# EAGLE library part STM32MP157FAB1 (library STM32MP157FAB1)
32-bit Microcontrollers - MCU 16/32-BITS MICROS Source: Datasheet <https://www.st.com/resource/en/datasheet/stm32mp157f.pdf>
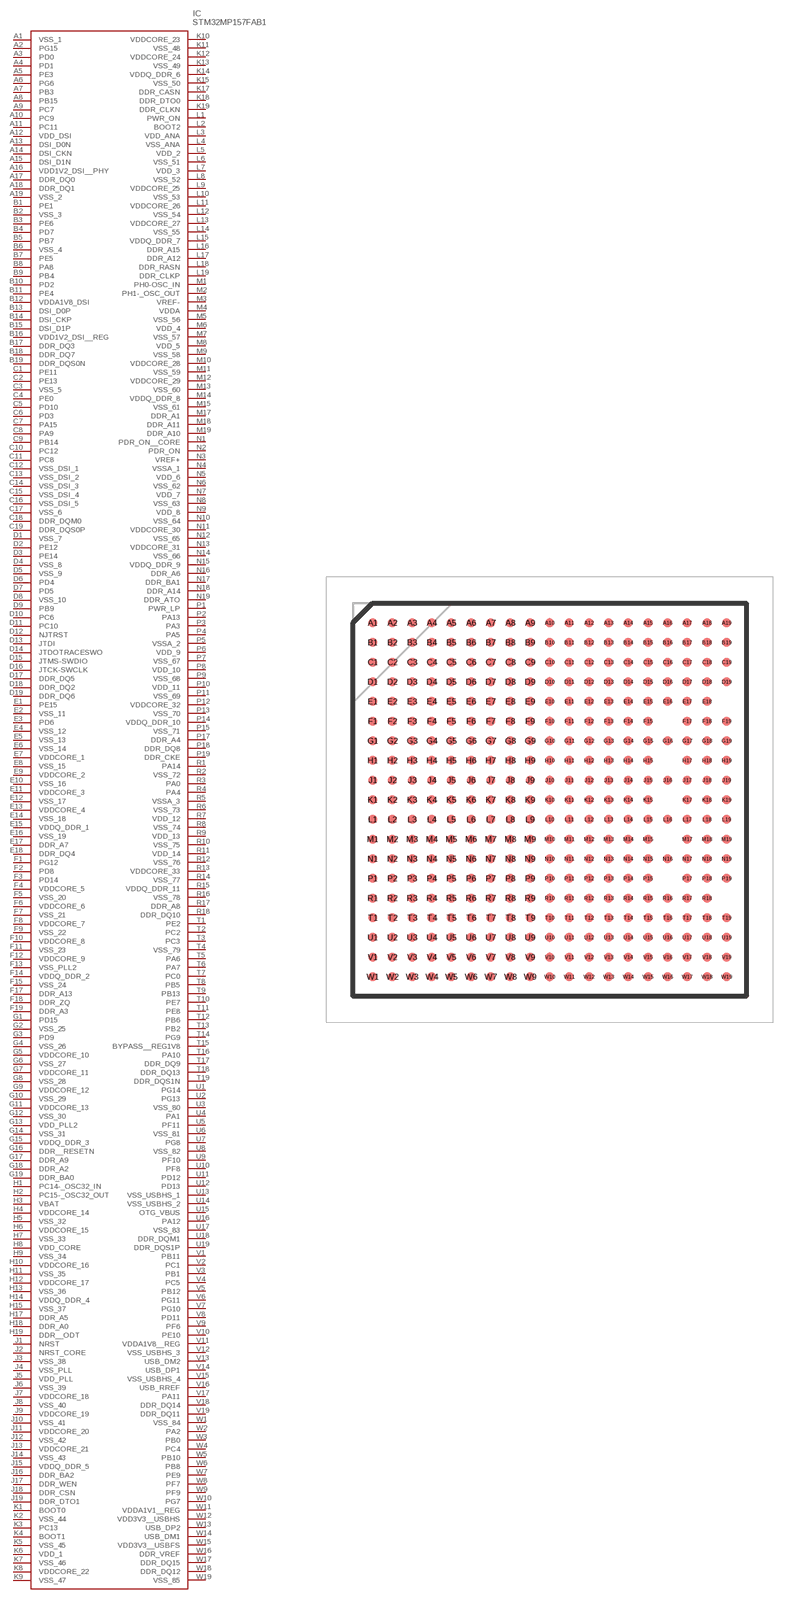
[diagram p0: symbol with the pads of BGA354C80P19X19_1600X1600X129; footprint BGA354C80P19X19_1600X1600X129]

Designator prefix IC

## STM32MP157FAB1 (Description: 32-bit Microcontrollers - MCU 16/32-BITS MICROS; Height: 1.29mm; Manufacturer_Name: STMicroelectronics; Manufacturer_Part_Number: STM32MP157FAB1; Mouser_Part_Number: 511-STM32MP157FAB1; Mouser_Price-Stock: https://www.mouser.co.uk/ProductDetail/STMicroelectronics/STM32MP157FAB1?qs=xZ%2FP%252Ba9zWqaMNhk4KMq8KA%3D%3D)  [BGA354C80P19X19_1600X1600X129]
A1  VSS_1
A2  PG15
A3  PD0
A4  PD1
A5  PE3
A6  PG6
A7  PB3
A8  PB15
A9  PC7
A10  PC9
A11  PC11
A12  VDD_DSI
A13  DSI_D0N
A14  DSI_CKN
A15  DSI_D1N
A16  VDD1V2_DSI__PHY
A17  DDR_DQ0
A18  DDR_DQ1
A19  VSS_2
B1  PE1
B2  VSS_3
B3  PE6
B4  PD7
B5  PB7
B6  VSS_4
B7  PE5
B8  PA8
B9  PB4
B10  PD2
B11  PE4
B12  VDDA1V8_DSI
B13  DSI_D0P
B14  DSI_CKP
B15  DSI_D1P
B16  VDD1V2_DSI__REG
B17  DDR_DQ3
B18  DDR_DQ7
B19  DDR_DQS0N
C1  PE11
C2  PE13
C3  VSS_5
C4  PE0
C5  PD10
C6  PD3
C7  PA15
C8  PA9
C9  PB14
C10  PC12
C11  PC8
C12  VSS_DSI_1
C13  VSS_DSI_2
C14  VSS_DSI_3
C15  VSS_DSI_4
C16  VSS_DSI_5
C17  VSS_6
C18  DDR_DQM0
C19  DDR_DQS0P
D1  VSS_7
D2  PE12
D3  PE14
D4  VSS_8
D5  VSS_9
D6  PD4
D7  PD5
D8  VSS_10
D9  PB9
D10  PC6
D11  PC10
D12  NJTRST
D13  JTDI
D14  JTDOTRACESWO
D15  JTMS-SWDIO
D16  JTCK-SWCLK
D17  DDR_DQ5
D18  DDR_DQ2
D19  DDR_DQ6
E1  PE15
E2  VSS_11
E3  PD6
E4  VSS_12
E5  VSS_13
E6  VSS_14
E7  VDDCORE_1
E8  VSS_15
E9  VDDCORE_2
E10  VSS_16
E11  VDDCORE_3
E12  VSS_17
E13  VDDCORE_4
E14  VSS_18
E15  VDDQ_DDR_1
E16  VSS_19
E17  DDR_A7
E18  DDR_DQ4
F1  PG12
F2  PD8
F3  PD14
F4  VDDCORE_5
F5  VSS_20
F6  VDDCORE_6
F7  VSS_21
F8  VDDCORE_7
F9  VSS_22
F10  VDDCORE_8
F11  VSS_23
F12  VDDCORE_9
F13  VSS_PLL2
F14  VDDQ_DDR_2
F15  VSS_24
F17  DDR_A13
F18  DDR_ZQ
F19  DDR_A3
G1  PD15
G2  VSS_25
G3  PD9
G4  VSS_26
G5  VDDCORE_10
G6  VSS_27
G7  VDDCORE_11
G8  VSS_28
G9  VDDCORE_12
G10  VSS_29
G11  VDDCORE_13
G12  VSS_30
G13  VDD_PLL2
G14  VSS_31
G15  VDDQ_DDR_3
G16  DDR__RESETN
G17  DDR_A9
G18  DDR_A2
G19  DDR_BA0
H1  PC14-_OSC32_IN
H2  PC15-_OSC32_OUT
H3  VBAT
H4  VDDCORE_14
H5  VSS_32
H6  VDDCORE_15
H7  VSS_33
H8  VDD_CORE
H9  VSS_34
H10  VDDCORE_16
H11  VSS_35
H12  VDDCORE_17
H13  VSS_36
H14  VDDQ_DDR_4
H15  VSS_37
H17  DDR_A5
H18  DDR_A0
H19  DDR__ODT
J1  NRST
J2  NRST_CORE
J3  VSS_38
J4  VSS_PLL
J5  VDD_PLL
J6  VSS_39
J7  VDDCORE_18
J8  VSS_40
J9  VDDCORE_19
J10  VSS_41
J11  VDDCORE_20
J12  VSS_42
J13  VDDCORE_21
J14  VSS_43
J15  VDDQ_DDR_5
J16  DDR_BA2
J17  DDR_WEN
J18  DDR_CSN
J19  DDR_DTO1
K1  BOOT0
K2  VSS_44
K3  PC13
K4  BOOT1
K5  VSS_45
K6  VDD_1
K7  VSS_46
K8  VDDCORE_22
K9  VSS_47
K10  VDDCORE_23
K11  VSS_48
K12  VDDCORE_24
K13  VSS_49
K14  VDDQ_DDR_6
K15  VSS_50
K17  DDR_CASN
K18  DDR_DTO0
K19  DDR_CLKN
L1  PWR_ON
L2  BOOT2
L3  VDD_ANA
L4  VSS_ANA
L5  VDD_2
L6  VSS_51
L7  VDD_3
L8  VSS_52
L9  VDDCORE_25
L10  VSS_53
L11  VDDCORE_26
L12  VSS_54
L13  VDDCORE_27
L14  VSS_55
L15  VDDQ_DDR_7
L16  DDR_A15
L17  DDR_A12
L18  DDR_RASN
L19  DDR_CLKP
M1  PH0-OSC_IN
M2  PH1-_OSC_OUT
M3  VREF-
M4  VDDA
M5  VSS_56
M6  VDD_4
M7  VSS_57
M8  VDD_5
M9  VSS_58
M10  VDDCORE_28
M11  VSS_59
M12  VDDCORE_29
M13  VSS_60
M14  VDDQ_DDR_8
M15  VSS_61
M17  DDR_A1
M18  DDR_A11
M19  DDR_A10
N1  PDR_ON__CORE
N2  PDR_ON
N3  VREF+
N4  VSSA_1
N5  VDD_6
N6  VSS_62
N7  VDD_7
N8  VSS_63
N9  VDD_8
N10  VSS_64
N11  VDDCORE_30
N12  VSS_65
N13  VDDCORE_31
N14  VSS_66
N15  VDDQ_DDR_9
N16  DDR_A6
N17  DDR_BA1
N18  DDR_A14
N19  DDR_ATO
P1  PWR_LP
P2  PA13
P3  PA3
P4  PA5
P5  VSSA_2
P6  VDD_9
P7  VSS_67
P8  VDD_10
P9  VSS_68
P10  VDD_11
P11  VSS_69
P12  VDDCORE_32
P13  VSS_70
P14  VDDQ_DDR_10
P15  VSS_71
P17  DDR_A4
P18  DDR_DQ8
P19  DDR_CKE
R1  PA14
R2  VSS_72
R3  PA0
R4  PA4
R5  VSSA_3
R6  VSS_73
R7  VDD_12
R8  VSS_74
R9  VDD_13
R10  VSS_75
R11  VDD_14
R12  VSS_76
R13  VDDCORE_33
R14  VSS_77
R15  VDDQ_DDR_11
R16  VSS_78
R17  DDR_A8
R18  DDR_DQ10
T1  PE2
T2  PC2
T3  PC3
T4  VSS_79
T5  PA6
T6  PA7
T7  PC0
T8  PB5
T9  PB13
T10  PE7
T11  PE8
T12  PB6
T13  PB2
T14  PG9
T15  BYPASS__REG1V8
T16  PA10
T17  DDR_DQ9
T18  DDR_DQ13
T19  DDR_DQS1N
U1  PG14
U2  PG13
U3  VSS_80
U4  PA1
U5  PF11
U6  VSS_81
U7  PG8
U8  VSS_82
U9  PF10
U10  PF8
U11  PD12
U12  PD13
U13  VSS_USBHS_1
U14  VSS_USBHS_2
U15  OTG_VBUS
U16  PA12
U17  VSS_83
U18  DDR_DQM1
U19  DDR_DQS1P
V1  PB11
V2  PC1
V3  PB1
V4  PC5
V5  PB12
V6  PG11
V7  PG10
V8  PD11
V9  PF6
V10  PE10
V11  VDDA1V8__REG
V12  VSS_USBHS_3
V13  USB_DM2
V14  USB_DP1
V15  VSS_USBHS_4
V16  USB_RREF
V17  PA11
V18  DDR_DQ14
V19  DDR_DQ11
W1  VSS_84
W2  PA2
W3  PB0
W4  PC4
W5  PB10
W6  PB8
W7  PE9
W8  PF7
W9  PF9
W10  PG7
W11  VDDA1V1__REG
W12  VDD3V3__USBHS
W13  USB_DP2
W14  USB_DM1
W15  VDD3V3__USBFS
W16  DDR_VREF
W17  DDR_DQ15
W18  DDR_DQ12
W19  VSS_85

## Footprint BGA354C80P19X19_1600X1600X129 (pad centres in mm)
LFBGA - 354balls, 16x16 mm, 0.8 mm pitch, low profile fine pitch ball grid array package outline
smd 0.37 x 0.37: A1 -7.2,7.2; A2 -6.4,7.2; A3 -5.6,7.2; A4 -4.8,7.2; A5 -4,7.2; A6 -3.2,7.2; A7 -2.4,7.2; A8 -1.6,7.2; A9 -0.8,7.2; A10 0,7.2; A11 0.8,7.2; A12 1.6,7.2; A13 2.4,7.2; A14 3.2,7.2; A15 4,7.2; A16 4.8,7.2; A17 5.6,7.2; A18 6.4,7.2; A19 7.2,7.2; B1 -7.2,6.4; B2 -6.4,6.4; B3 -5.6,6.4; B4 -4.8,6.4; B5 -4,6.4; B6 -3.2,6.4; B7 -2.4,6.4; B8 -1.6,6.4; B9 -0.8,6.4; B10 0,6.4; B11 0.8,6.4; B12 1.6,6.4; B13 2.4,6.4; B14 3.2,6.4; B15 4,6.4; B16 4.8,6.4; B17 5.6,6.4; B18 6.4,6.4; B19 7.2,6.4; C1 -7.2,5.6; C2 -6.4,5.6; C3 -5.6,5.6; C4 -4.8,5.6; C5 -4,5.6; C6 -3.2,5.6; C7 -2.4,5.6; C8 -1.6,5.6; C9 -0.8,5.6; C10 0,5.6; C11 0.8,5.6; C12 1.6,5.6; C13 2.4,5.6; C14 3.2,5.6; C15 4,5.6; C16 4.8,5.6; C17 5.6,5.6; C18 6.4,5.6; C19 7.2,5.6; D1 -7.2,4.8; D2 -6.4,4.8; D3 -5.6,4.8; D4 -4.8,4.8; D5 -4,4.8; D6 -3.2,4.8; D7 -2.4,4.8; D8 -1.6,4.8; D9 -0.8,4.8; D10 0,4.8; D11 0.8,4.8; D12 1.6,4.8; D13 2.4,4.8; D14 3.2,4.8; D15 4,4.8; D16 4.8,4.8; D17 5.6,4.8; D18 6.4,4.8; D19 7.2,4.8; E1 -7.2,4; E2 -6.4,4; E3 -5.6,4; E4 -4.8,4; E5 -4,4; E6 -3.2,4; E7 -2.4,4; E8 -1.6,4; E9 -0.8,4; E10 0,4; E11 0.8,4; E12 1.6,4; E13 2.4,4; E14 3.2,4; E15 4,4; E16 4.8,4; E17 5.6,4; E18 6.4,4; F1 -7.2,3.2; F2 -6.4,3.2; F3 -5.6,3.2; F4 -4.8,3.2; F5 -4,3.2; F6 -3.2,3.2; F7 -2.4,3.2; F8 -1.6,3.2; F9 -0.8,3.2; F10 0,3.2; F11 0.8,3.2; F12 1.6,3.2; F13 2.4,3.2; F14 3.2,3.2; F15 4,3.2; F17 5.6,3.2; F18 6.4,3.2; F19 7.2,3.2; G1 -7.2,2.4; G2 -6.4,2.4; G3 -5.6,2.4; G4 -4.8,2.4; G5 -4,2.4; G6 -3.2,2.4; G7 -2.4,2.4; G8 -1.6,2.4; G9 -0.8,2.4; G10 0,2.4; G11 0.8,2.4; G12 1.6,2.4; G13 2.4,2.4; G14 3.2,2.4; G15 4,2.4; G16 4.8,2.4; G17 5.6,2.4; G18 6.4,2.4; G19 7.2,2.4; H1 -7.2,1.6; H2 -6.4,1.6; H3 -5.6,1.6; H4 -4.8,1.6; H5 -4,1.6; H6 -3.2,1.6; H7 -2.4,1.6; H8 -1.6,1.6; H9 -0.8,1.6; H10 0,1.6; H11 0.8,1.6; H12 1.6,1.6; H13 2.4,1.6; H14 3.2,1.6; H15 4,1.6; H17 5.6,1.6; H18 6.4,1.6; H19 7.2,1.6; J1 -7.2,0.8; J2 -6.4,0.8; J3 -5.6,0.8; J4 -4.8,0.8; J5 -4,0.8; J6 -3.2,0.8; J7 -2.4,0.8; J8 -1.6,0.8; J9 -0.8,0.8; J10 0,0.8; J11 0.8,0.8; J12 1.6,0.8; J13 2.4,0.8; J14 3.2,0.8; J15 4,0.8; J16 4.8,0.8; J17 5.6,0.8; J18 6.4,0.8; J19 7.2,0.8; K1 -7.2,0; K2 -6.4,0; K3 -5.6,0; K4 -4.8,0; K5 -4,0; K6 -3.2,0; K7 -2.4,0; K8 -1.6,0; K9 -0.8,0; K10 0,0; K11 0.8,0; K12 1.6,0; K13 2.4,0; K14 3.2,0; K15 4,0; K17 5.6,0; K18 6.4,0; K19 7.2,0; L1 -7.2,-0.8; L2 -6.4,-0.8; L3 -5.6,-0.8; L4 -4.8,-0.8; L5 -4,-0.8; L6 -3.2,-0.8; L7 -2.4,-0.8; L8 -1.6,-0.8; L9 -0.8,-0.8; L10 0,-0.8; L11 0.8,-0.8; L12 1.6,-0.8; L13 2.4,-0.8; L14 3.2,-0.8; L15 4,-0.8; L16 4.8,-0.8; L17 5.6,-0.8; L18 6.4,-0.8; L19 7.2,-0.8; M1 -7.2,-1.6; M2 -6.4,-1.6; M3 -5.6,-1.6; M4 -4.8,-1.6; M5 -4,-1.6; M6 -3.2,-1.6; M7 -2.4,-1.6; M8 -1.6,-1.6; M9 -0.8,-1.6; M10 0,-1.6; M11 0.8,-1.6; M12 1.6,-1.6; M13 2.4,-1.6; M14 3.2,-1.6; M15 4,-1.6; M17 5.6,-1.6; M18 6.4,-1.6; M19 7.2,-1.6; N1 -7.2,-2.4; N2 -6.4,-2.4; N3 -5.6,-2.4; N4 -4.8,-2.4; N5 -4,-2.4; N6 -3.2,-2.4; N7 -2.4,-2.4; N8 -1.6,-2.4; N9 -0.8,-2.4; N10 0,-2.4; N11 0.8,-2.4; N12 1.6,-2.4; N13 2.4,-2.4; N14 3.2,-2.4; N15 4,-2.4; N16 4.8,-2.4; N17 5.6,-2.4; N18 6.4,-2.4; N19 7.2,-2.4; P1 -7.2,-3.2; P2 -6.4,-3.2; P3 -5.6,-3.2; P4 -4.8,-3.2; P5 -4,-3.2; P6 -3.2,-3.2; P7 -2.4,-3.2; P8 -1.6,-3.2; P9 -0.8,-3.2; P10 0,-3.2; P11 0.8,-3.2; P12 1.6,-3.2; P13 2.4,-3.2; P14 3.2,-3.2; P15 4,-3.2; P17 5.6,-3.2; P18 6.4,-3.2; P19 7.2,-3.2; R1 -7.2,-4; R2 -6.4,-4; R3 -5.6,-4; R4 -4.8,-4; R5 -4,-4; R6 -3.2,-4; R7 -2.4,-4; R8 -1.6,-4; R9 -0.8,-4; R10 0,-4; R11 0.8,-4; R12 1.6,-4; R13 2.4,-4; R14 3.2,-4; R15 4,-4; R16 4.8,-4; R17 5.6,-4; R18 6.4,-4; T1 -7.2,-4.8; T2 -6.4,-4.8; T3 -5.6,-4.8; T4 -4.8,-4.8; T5 -4,-4.8; T6 -3.2,-4.8; T7 -2.4,-4.8; T8 -1.6,-4.8; T9 -0.8,-4.8; T10 0,-4.8; T11 0.8,-4.8; T12 1.6,-4.8; T13 2.4,-4.8; T14 3.2,-4.8; T15 4,-4.8; T16 4.8,-4.8; T17 5.6,-4.8; T18 6.4,-4.8; T19 7.2,-4.8; U1 -7.2,-5.6; U2 -6.4,-5.6; U3 -5.6,-5.6; U4 -4.8,-5.6; U5 -4,-5.6; U6 -3.2,-5.6; U7 -2.4,-5.6; U8 -1.6,-5.6; U9 -0.8,-5.6; U10 0,-5.6; U11 0.8,-5.6; U12 1.6,-5.6; U13 2.4,-5.6; U14 3.2,-5.6; U15 4,-5.6; U16 4.8,-5.6; U17 5.6,-5.6; U18 6.4,-5.6; U19 7.2,-5.6; V1 -7.2,-6.4; V2 -6.4,-6.4; V3 -5.6,-6.4; V4 -4.8,-6.4; V5 -4,-6.4; V6 -3.2,-6.4; V7 -2.4,-6.4; V8 -1.6,-6.4; V9 -0.8,-6.4; V10 0,-6.4; V11 0.8,-6.4; V12 1.6,-6.4; V13 2.4,-6.4; V14 3.2,-6.4; V15 4,-6.4; V16 4.8,-6.4; V17 5.6,-6.4; V18 6.4,-6.4; V19 7.2,-6.4; W1 -7.2,-7.2; W2 -6.4,-7.2; W3 -5.6,-7.2; W4 -4.8,-7.2; W5 -4,-7.2; W6 -3.2,-7.2; W7 -2.4,-7.2; W8 -1.6,-7.2; W9 -0.8,-7.2; W10 0,-7.2; W11 0.8,-7.2; W12 1.6,-7.2; W13 2.4,-7.2; W14 3.2,-7.2; W15 4,-7.2; W16 4.8,-7.2; W17 5.6,-7.2; W18 6.4,-7.2; W19 7.2,-7.2